# Altium footprint library TWOTREES_TMC2209_V20.PcbLib: 1 footprints
Each footprint in its own frame and in the unit in brackets; x right, y up, seen from the top. Pads: shape width x height; smd on the part's side, far side on the other; paste and mask are expansions set on the pad; w line width, h text height; cw(c..) or ccw(c..) is an arc to the next point about the centre after c.
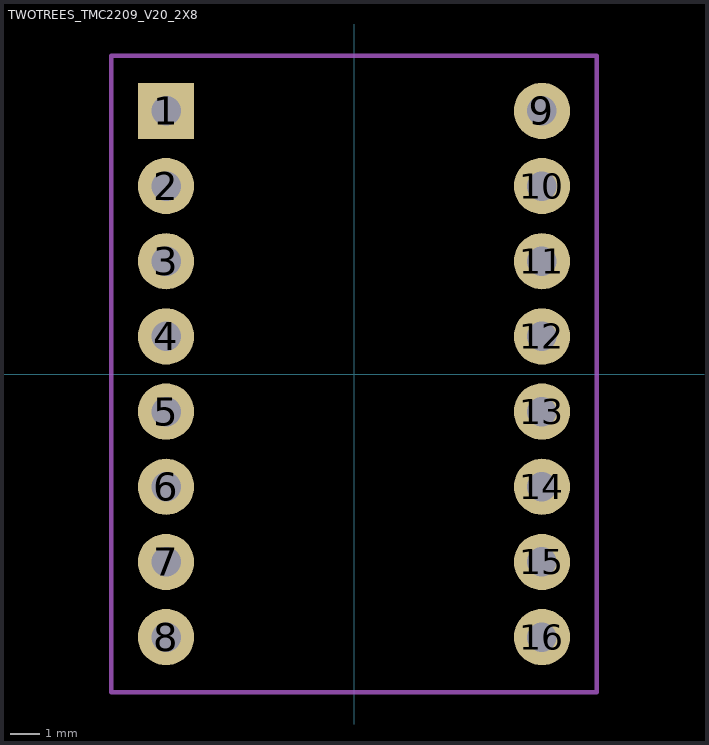
[diagram p0: the footprint, top view; thin cyan lines are the x and y axes]

## TWOTREES_TMC2209_V20_2X8 [mm] "TWOTREES TMC2209 V2.0; 2x8 sockets; nominal mechanical study Rev B; blue heatsink embedded"
height 22.315
pads (16):
  rect 1.9x1.9 hole 1: 1(-6.35,8.89)
  round 1.9 hole 1: 2(-6.35,6.35) 3(-6.35,3.81) 4(-6.35,1.27) 5(-6.35,-1.27) 6(-6.35,-3.81) 7(-6.35,-6.35) 8(-6.35,-8.89) 9(6.35,8.89) 10(6.35,6.35) 11(6.35,3.81) 12(6.35,1.27) 13(6.35,-1.27) 14(6.35,-3.81) 15(6.35,-6.35) 16(6.35,-8.89)
Mid20:
  lines w0.15: -7.62,-10.16 7.62,-10.16 7.62,10.16 -7.62,10.16 -7.62,-10.16
  text ".Designator" at -7.62,11.5 h1
  text "EN" at -5.1,8 h0.7
  text "VM" at 3.8,8 h0.7
Mech2:
  lines w0.15: -8.2,-10.75 8.2,-10.75 8.2,10.75 -8.2,10.75 -8.2,-10.75
3D body "TWOTREES_TMC2209_V20_Completo.step": height 22.31, standoff 0, extent -7.62,-10.16 7.62,10.16